# Altium footprint library PcbLib.PcbLib: 162 footprints (part 7 of 11)
Each footprint in its own frame and in the unit in brackets; x right, y up, seen from the top. Pads: shape width x height; smd on the part's side, far side on the other; paste and mask are expansions set on the pad; w line width, h text height; cw(c..) or ccw(c..) is an arc to the next point about the centre after c.
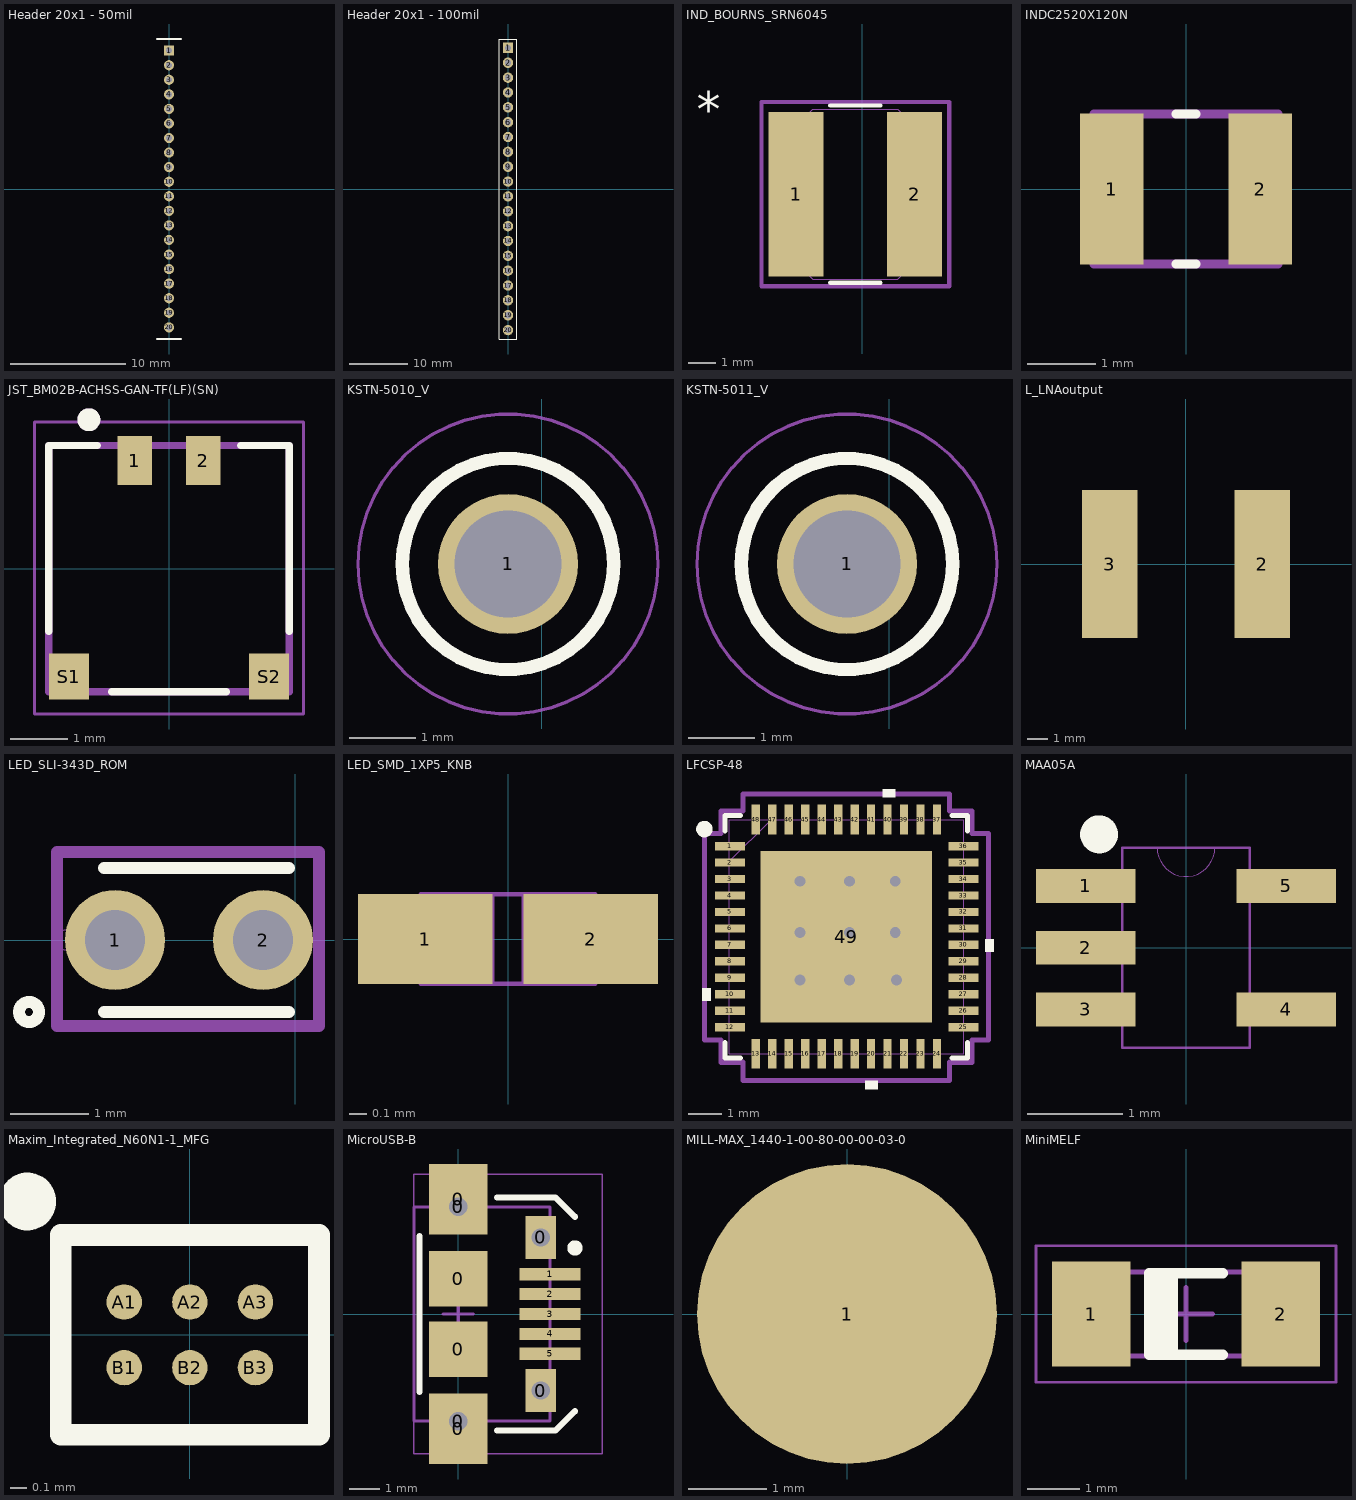
[diagram p6: the footprints below, top view; thin cyan lines are the x and y axes]

## Header 20x1 - 50mil [mil] "20-Pin, 20 Row, 1 Column. 50mil, Header"
height 488.19
pads (20):
  rect 35x35 hole 20: 1(0,475)
  round 35 hole 20: 2(0,425) 3(0,375) 4(0,325) 5(0,275) 6(0,225) 7(0,175) 8(0,125) 9(0,75) 10(0,25) 11(0,-25) 12(0,-75) 13(0,-125) 14(0,-175) 15(0,-225) 16(0,-275) 17(0,-325) 18(0,-375) 19(0,-425) 20(0,-475)
Top Overlay:
  lines w7.87: -40,-515 40,-515 ; -40,515 40,515
3D body "User Library-HDRV20W46P127_1X20_2540X250X880.STEP": height 255.91, standoff -90.55, extent -49.21,-500 49.21,500

## Header 20x1 - 100mil [mil] "20-Pin, 20 Row, 1 Column , 100mil, Header"
height 488.19
pads (20):
  rect 70x70 hole 42: 1(0,950)
  round 70 hole 42: 2(0,850) 3(0,750) 4(0,650) 5(0,550) 6(0,450) 7(0,350) 8(0,250) 9(0,150) 10(0,50) 11(0,-50) 12(0,-150) 13(0,-250) 14(0,-350) 15(0,-450) 16(0,-550) 17(0,-650) 18(0,-750) 19(0,-850) 20(0,-950)
Top Overlay:
  lines w7.87: -60,-1010 -60,1010 60,1010 60,-1010 -60,-1010
3D body "pin_header_aw140-eg-g20d.stp": height 322.83, standoff -118.11, extent -49.04,-1003.94 49.32,996.06

## IND_BOURNS_SRN6045 [mil]
pads (2):
  rect 79x236 smd paste+0 mask+0: 1(-95,-3105) 2(75,-3105)
Top Overlay:
  lines w6: -45.98,-3232 25.98,-3232 ; -45.98,-2978 25.98,-2978
  text "*" at -237,-3008 h50
Mechanical 13:
  lines w1: -132,-3166 -71,-3227 51,-3227 112,-3166 112,-3044 51,-2983 -71,-2983 -132,-3044 -132,-3166
  text "*" at -124.5,-3155 h50
Mechanical 15:
  lines w6: -144.5,-3237 124.5,-3237 124.5,-2973 -144.5,-2973 -144.5,-3237
3D body: height 10, standoff 0, extent -10,-3105 0,-3095
3D body "srn6045.stp": height 177.67, standoff 0.5, extent -128.11,-3223.1 108.11,-2986.88

## INDC2520X120N [mm]
pads (2):
  rect 0.935x2.22 smd: 1(-1.09,0) 2(1.09,0)
Top Overlay:
  lines w0.127: -0.15,-1.1 0.15,-1.1 ; -0.15,1.1 0.15,1.1
Mechanical 13:
  lines w0.127: -1.35,-1.1 1.35,-1.1 1.35,1.1 -1.35,1.1 -1.35,-1.1
3D body "DFE252012F-100M=P2.STEP": height 1.21, standoff 0.01, extent -1.25,-1 1.25,1

## JST_BM02B-ACHSS-GAN-TF(LF)(SN) [mm]
pads (4):
  rect 0.6x0.85 smd: 1(-0.6,1.887) 2(0.6,1.887)
  rect 0.7x0.8 smd: S1(-1.75,-1.887) S2(1.75,-1.887)
Top Overlay:
  circle w0.2: c-1.4,2.6 r0.1
  lines w0.127: -2.1,-1.1 -2.1,2.15 -1.25,2.15 ; -1,-2.15 1,-2.15 ; 1.25,2.15 2.1,2.15 2.1,-1.1
Mechanical 13:
  circle w0.2: c-1.4,2.6 r0.1
  lines w0.127: -2.1,-2.15 -2.1,2.15 2.1,2.15 2.1,-2.15 -2.1,-2.15
Mechanical 15:
  lines w0.05: -2.35,-2.54 -2.35,2.562 2.35,2.562 2.35,-2.54 -2.35,-2.54
3D body "step_temp.STEP": height 1.45, standoff 0, extent -2.1,-2.15 2.1,2.15

## KSTN-5010_V [mm]
pads (1):
  round 2.1 hole 1.6: 1(-0.508,-10.414)
Top Overlay:
  circle w0.2: c-0.508,-10.414 r1.585
Mechanical 13:
  circle w0.1: c-0.508,-10.414 r1.585
Mechanical 15:
  circle w0.05: c-0.508,-10.414 r2.25
  lines w0.1: -1.008,-10.414 -0.008,-10.414 ; -0.508,-10.914 -0.508,-9.914
3D body "keystone-PN5010.STEP": height 8.13, standoff -3.17, extent -2.095,-12.001 1.08,-8.826

## KSTN-5011_V [mm]
pads (1):
  round 2.1 hole 1.6: 1(-0.635,-5.969)
Top Overlay:
  circle w0.2: c-0.635,-5.969 r1.585
Mechanical 13:
  circle w0.1: c-0.635,-5.969 r1.585
Mechanical 15:
  circle w0.05: c-0.635,-5.969 r2.25
  lines w0.1: -1.135,-5.969 -0.135,-5.969 ; -0.635,-6.469 -0.635,-5.469
3D body "keystone-PN5011.STEP": height 8.13, standoff -3.17, extent -2.222,-7.556 0.953,-4.381

## L_LNAoutput [mil]
pads (2):
  rect 107x285 smd: 2(147,0) 3(-146,0)
3D body "Coilcraft-2222SQ-181.STEP": height 228.96, standoff 0.38, extent -165.36,-117.57 169.36,117

## LED_SLI-343D_ROM [mil]
pads (2):
  round 50 hole 30 mask+0: 1(-90,0) 2(-16,0)
Top Overlay:
  circle w6: c-133,-36 r5
  lines w6: -95.52,-36 -2.91,-36 ; -95.52,36 -2.91,36
Mechanical 13:
  circle w0: c-114.21,0 r5
  lines w6: -108.43,0 -88.43,0 ; -98.43,-10 -98.43,10
Mechanical 15:
  lines w6: -119,-43 12,-43 12,44 -119,44 -119,-43

## LED_SMD_1XP5_KNB [mil]
pads (2):
  rect 30x20 smd paste+0 mask+0: 1(-18.5,0) 2(18.5,0)
Mechanical 13:
  lines w1: -19.5,-10 -19.5,10 ; -19.5,-10 -3.5,-10 -3.5,10 -19.5,10 ; -19.5,-10 19.5,-10 ; -19.5,-10 -19.5,10 ; -19.5,10 19.5,10 ; 19.5,-10 3.5,-10 3.5,10 19.5,10 ; 19.5,-10 19.5,10 ; 19.5,-10 19.5,10
3D body "LED_SMD_1XP5_KNB.step": height 20, standoff 0, extent -19.49,-10 19.49,10

## LFCSP-48 [mil]
pads (49):
  rect 35.43x10 smd paste+0 mask+0: 1(1469.54,-9749.29) 2(1469.54,-9768.98) 3(1469.54,-9788.66) 4(1469.54,-9808.35) 5(1469.54,-9828.03) 6(1469.54,-9847.72) 7(1469.54,-9867.4) 8(1469.54,-9887.09) 9(1469.54,-9906.77) 10(1469.54,-9926.46) 11(1469.54,-9946.14) 12(1469.54,-9965.83) 25(1748.5,-9965.83) 26(1748.5,-9946.14) 27(1748.5,-9926.46) 28(1748.5,-9906.77) 29(1748.5,-9887.09) 30(1748.5,-9867.4) 31(1748.5,-9847.72) 32(1748.5,-9828.03) 33(1748.5,-9808.35) 34(1748.5,-9788.66) 35(1748.5,-9768.98) 36(1748.5,-9749.29)
  rect 10x35.43 smd paste+0 mask+0: 13(1500.28,-9997.51) 14(1519.96,-9997.51) 15(1539.65,-9997.51) 16(1559.33,-9997.51) 17(1579.02,-9997.51) 18(1598.7,-9997.51) 19(1618.39,-9997.51) 20(1638.07,-9997.51) 21(1657.76,-9997.51) 22(1677.44,-9997.51) 23(1697.13,-9997.51) 24(1716.81,-9997.51) 37(1716.81,-9717.56) 38(1697.13,-9717.56) 39(1677.44,-9717.56) 40(1657.76,-9717.56) 41(1638.07,-9717.56) 42(1618.39,-9717.56) 43(1598.7,-9717.56) 44(1579.02,-9717.56) 45(1559.33,-9717.56) 46(1539.65,-9717.56) 47(1519.96,-9717.56) 48(1500.28,-9717.56)
  rect 205x205 smd paste-102 mask+0: 49(1608.54,-9857.56)
via 1553.15,-9909.45 diameter 25.98 hole 12.99
via 1612.2,-9909.45 diameter 25.98 hole 12.99
via 1668.31,-9909.45 diameter 25.98 hole 12.99
via 1666.95,-9791.34 diameter 25.98 hole 12.99
via 1612.2,-9791.34 diameter 25.98 hole 12.99
via 1553.15,-9791.34 diameter 25.98 hole 12.99
via 1666.95,-9852.36 diameter 25.98 hole 12.99
via 1612.2,-9852.36 diameter 25.98 hole 12.99
via 1553.15,-9852.36 diameter 25.98 hole 12.99
Top Overlay:
  circle w9.84: c1439,-9729 r4.92
  region: 1446.54,-9918.96 1436.54,-9918.96 1436.54,-9933.96 1446.54,-9933.96
  region: 1646.28,-10029.53 1631.28,-10029.53 1631.28,-10039.53 1646.28,-10039.53
  region: 1774.61,-9860.61 1784.61,-9860.61 1784.61,-9875.61 1774.61,-9875.61
  region: 1666.95,-9691.1 1651.95,-9691.1 1651.95,-9681.1 1666.95,-9681.1
  lines w6: 1463.54,-9983.93 1463.54,-10002.56 1482.18,-10002.56 ; 1463.54,-9731.19 1463.54,-9712.56 1482.18,-9712.56 ; 1734.91,-10002.56 1753.54,-10002.56 1753.54,-9983.93 ; 1734.91,-9712.56 1753.54,-9712.56 1753.54,-9731.19
Top Paste:
  region: 1553.36,-9759 1509.98,-9759 1509.98,-9802.37 1553.36,-9802.37
  region: 1553.36,-9810.25 1509.98,-9810.25 1509.98,-9853.62 1553.36,-9853.62
  region: 1553.36,-9861.5 1509.98,-9861.5 1509.98,-9904.87 1553.36,-9904.87
  region: 1553.36,-9912.75 1509.98,-9912.75 1509.98,-9956.12 1553.36,-9956.12
  region: 1604.61,-9759 1561.23,-9759 1561.23,-9802.37 1604.61,-9802.37
  region: 1604.61,-9810.25 1561.23,-9810.25 1561.23,-9853.62 1604.61,-9853.62
  region: 1604.61,-9861.5 1561.23,-9861.5 1561.23,-9904.87 1604.61,-9904.87
  region: 1604.61,-9912.75 1561.23,-9912.75 1561.23,-9956.12 1604.61,-9956.12
  region: 1655.86,-9759 1612.48,-9759 1612.48,-9802.37 1655.86,-9802.37
  region: 1655.86,-9810.25 1612.48,-9810.25 1612.48,-9853.62 1655.86,-9853.62
  region: 1655.86,-9861.5 1612.48,-9861.5 1612.48,-9904.87 1655.86,-9904.87
  region: 1655.86,-9912.75 1612.48,-9912.75 1612.48,-9956.12 1655.86,-9956.12
  region: 1707.11,-9759 1663.73,-9759 1663.73,-9802.37 1707.11,-9802.37
  region: 1707.11,-9810.25 1663.73,-9810.25 1663.73,-9853.62 1707.11,-9853.62
  region: 1707.11,-9861.5 1663.73,-9861.5 1663.73,-9904.87 1707.11,-9904.87
  region: 1707.11,-9912.75 1663.73,-9912.75 1663.73,-9956.12 1707.11,-9956.12
Mechanical 13:
  lines w1: 1468.54,-9767.56 1518.54,-9717.56 ; 1468.54,-9997.56 1748.54,-9997.56 1748.54,-9717.56 1468.54,-9717.56 1468.54,-9997.56 ; 1468.54,-9971.83 1468.54,-9959.83 1468.54,-9971.83 ; 1468.54,-9952.14 1468.54,-9940.14 1468.54,-9952.14 ; 1468.54,-9932.46 1468.54,-9920.46 1468.54,-9932.46 ; 1468.54,-9912.77 1468.54,-9900.77 1468.54,-9912.77 ; 1468.54,-9893.09 1468.54,-9881.09 1468.54,-9893.09 ; 1468.54,-9873.4 1468.54,-9861.4 1468.54,-9873.4 ; 1468.54,-9853.72 1468.54,-9841.72 1468.54,-9853.72 ; 1468.54,-9834.03 1468.54,-9822.03 1468.54,-9834.03 ; 1468.54,-9814.35 1468.54,-9802.35 1468.54,-9814.35 ; 1468.54,-9794.66 1468.54,-9782.66 1468.54,-9794.66 ; 1468.54,-9774.98 1468.54,-9762.98 1468.54,-9774.98 ; 1468.54,-9755.29 1468.54,-9743.29 1468.54,-9755.29 ; 1494.28,-9997.56 1506.28,-9997.56 1494.28,-9997.56 ; 1494.28,-9717.56 1506.28,-9717.56 1494.28,-9717.56 ; 1513.96,-9997.56 1525.96,-9997.56 1513.96,-9997.56 ; 1513.96,-9717.56 1525.96,-9717.56 1513.96,-9717.56 ; 1533.65,-9997.56 1545.65,-9997.56 1533.65,-9997.56 ; 1533.65,-9717.56 1545.65,-9717.56 1533.65,-9717.56 ; 1553.33,-9997.56 1565.33,-9997.56 1553.33,-9997.56 ; 1553.33,-9717.56 1565.33,-9717.56 1553.33,-9717.56 ; 1573.02,-9997.56 1585.02,-9997.56 1573.02,-9997.56 ; 1573.02,-9717.56 1585.02,-9717.56 1573.02,-9717.56 ; 1592.7,-9997.56 1604.7,-9997.56 1592.7,-9997.56 ; 1592.7,-9717.56 1604.7,-9717.56 1592.7,-9717.56 ; 1612.39,-9997.56 1624.39,-9997.56 1612.39,-9997.56 ; 1612.39,-9717.56 1624.39,-9717.56 1612.39,-9717.56 ; 1632.07,-9997.56 1644.07,-9997.56 1632.07,-9997.56 ; 1632.07,-9717.56 1644.07,-9717.56 1632.07,-9717.56 ; 1651.76,-9997.56 1663.76,-9997.56 1651.76,-9997.56 ; 1651.76,-9717.56 1663.76,-9717.56 1651.76,-9717.56 ; 1671.44,-9997.56 1683.44,-9997.56 1671.44,-9997.56 ; 1671.44,-9717.56 1683.44,-9717.56 1671.44,-9717.56 ; 1691.13,-9997.56 1703.13,-9997.56 1691.13,-9997.56 ; 1691.13,-9717.56 1703.13,-9717.56 1691.13,-9717.56 ; 1710.81,-9997.56 1722.81,-9997.56 1710.81,-9997.56 ; 1710.81,-9717.56 1722.81,-9717.56 1710.81,-9717.56 ; 1748.54,-9971.83 1748.54,-9959.83 1748.54,-9971.83 ; 1748.54,-9952.14 1748.54,-9940.14 1748.54,-9952.14 ; 1748.54,-9932.46 1748.54,-9920.46 1748.54,-9932.46 ; 1748.54,-9912.77 1748.54,-9900.77 1748.54,-9912.77 ; 1748.54,-9893.09 1748.54,-9881.09 1748.54,-9893.09 ; 1748.54,-9873.4 1748.54,-9861.4 1748.54,-9873.4 ; 1748.54,-9853.72 1748.54,-9841.72 1748.54,-9853.72 ; 1748.54,-9834.03 1748.54,-9822.03 1748.54,-9834.03 ; 1748.54,-9814.35 1748.54,-9802.35 1748.54,-9814.35 ; 1748.54,-9794.66 1748.54,-9782.66 1748.54,-9794.66 ; 1748.54,-9774.98 1748.54,-9762.98 1748.54,-9774.98 ; 1748.54,-9755.29 1748.54,-9743.29 1748.54,-9755.29
  text "*" at 1474.04,-9764.45 h50
Mechanical 15:
  lines w6: 1439,-9980.83 1458.54,-9980.83 1458.54,-10007.56 1485.28,-10007.56 1485.28,-10029.53 1731.81,-10029.53 1731.81,-10007.56 1758.54,-10007.56 1758.54,-9980.83 1778.54,-9980.83 1778.54,-9734.29 1758.54,-9734.29 1758.54,-9707.56 1731.81,-9707.56 1731.81,-9687.01 1485.28,-9687.01 1485.28,-9707.56 1458.54,-9707.56 1458.54,-9734.29 1439,-9734.29 1439,-9980.83
3D body "CP-48-4_ADI.step": height 32.09, standoff 0, extent 1468.55,-9997.56 1748.55,-9717.55
3D body: height 10, standoff 0, extent 1608.54,-9857.56 1618.54,-9847.56

## MAA05A [mil]
pads (5):
  rect 41.34x14 smd mask+4: 1(-41.5,25.59) 2(-41.5,0) 3(-41.5,-25.59) 4(41.5,-25.59) 5(41.5,25.59)
Top Overlay:
  circle w9.84: c-36,47 r2.94
Mechanical 13:
  lines w0: -12,41.5 ccw(c0,41.5) 12,41.5
  lines w1: -47.5,-31.59 -26.5,-31.59 -26.5,-19.59 -47.5,-19.59 -47.5,-31.59 ; -47.5,-6 -26.5,-6 -26.5,6 -47.5,6 -47.5,-6 ; -47.5,19.59 -26.5,19.59 -26.5,31.59 -47.5,31.59 -47.5,19.59 ; -26.5,-41.5 -26.5,41.5 26.5,41.5 26.5,-41.5 -26.5,-41.5 ; 26.5,-31.59 47.5,-31.59 47.5,-19.59 26.5,-19.59 26.5,-31.59 ; 26.5,19.59 47.5,19.59 47.5,31.59 26.5,31.59 26.5,19.59
3D body "MAA05A.step": height 43.11, standoff 0, extent -47.52,-41.5 47.52,41.5

## Maxim_Integrated_N60N1-1_MFG [mm]
pads (6):
  round 0.216 smd mask+0.064: A1(-0.4,0.2) A2(0,0.2) A3(0.4,0.2) B1(-0.4,-0.2) B2(0,-0.2) B3(0.4,-0.2)
Top Overlay:
  circle w0.25: c-0.991,0.813 r0.051
  lines w0.133: -0.787,-0.61 -0.787,0.61 0.787,0.61 0.787,-0.61 -0.787,-0.61
3D body "IC_Maxim_Integrated_MAX17291ANT+T_eec.STEP": height 0.5, standoff 0, extent -0.634,-0.434 0.634,0.434

## MicroUSB-B [mm] "Conn Micro USB Type B RCP 5"
height 2
pads (13):
  rect 1.9x2.3 smd: 0(0,-3.75) 0(0,3.75)
  rect 1.8x1.1 hole 0.6 square: 0(0,-3.5) 0(0,3.505)
  rect 1.9x1.8 smd: 0(0,-1.15) 0(0,1.15)
  rect 1x1.4 hole 0.6 square: 0(2.7,-2.5) 0(2.7,2.5)
  rect 2x0.4 smd: 1(3,1.3) 2(3,0.65) 3(3,0) 4(3,-0.65) 5(3,-1.3)
Top Overlay:
  circle w0.25: c3.81,2.159 r0.125
  lines w0.2: -1.27,-2.54 -1.27,2.54 ; 1.27,-3.81 3.175,-3.81 3.81,-3.175 ; 1.27,3.81 3.175,3.81 3.81,3.175
Mechanical 13:
  lines w0.1: -1.45,-3.5 3,-3.5 3,3.5 -1.45,3.5 -1.45,-3.5
Mechanical 15:
  lines w0.05: -1.45,-4.572 4.699,-4.572 4.699,4.572 -1.45,4.572 -1.45,-4.572
  lines w0.1: -0.5,0 0.5,0 ; 0,-0.5 0,0.5
3D body "1050170001.stp": height 2.71, standoff -0.59, extent -2.623,-4.125 2.777,4.075

## MILL-MAX_1440-1-00-80-00-00-03-0 [mm]
height 5.21
pads (1):
  round 3.812 smd mask+0.05: 1(0,0)
Mechanical 13:
  circle w0.127: c0,0 r1.27
3D body "step_temp.STEP": height 5.08, standoff 0, extent -1.27,-1.27 1.27,1.27

## MiniMELF [mm] "MELF Diode, 2-Leads, Body 3.50x1.50mm, IPC Medium Density"
height 1.6
pads (2):
  rect 1.5x2 smd: 1(-1.8,0) 2(1.8,0)
Top Overlay:
  rectangle: -0.7,-0.775 -0.15,0.775
  lines w0.2: 0.7,-0.775 -0.7,-0.775 -0.7,0.775 0.7,0.775
Mechanical 13:
  lines w0.1: -1.85,-0.8 -1.85,0.8 1.85,0.8 1.85,-0.8 -1.85,-0.8
Mechanical 15:
  lines w0.05: -2.85,-1.3 -2.85,1.3 2.85,1.3 2.85,-1.3 -2.85,-1.3
  lines w0.1: -0.5,0 0.5,0 ; 0,-0.5 0,0.5
3D body: height 1.59, standoff 0, extent -1.85,-0.8 -1.38,0.797
3D body: height 1.58, standoff 0.04, extent -0.78,-0.771 -0.18,0.768
3D body: height 1.58, standoff 0.04, extent -1.38,-0.77 1.38,0.767
3D body: height 1.59, standoff 0, extent 1.38,-0.8 1.85,0.797